# Altium footprint library 2020-06-27_15-02-51.PcbLib: 1 footprints
Each footprint in its own frame and in the unit in brackets; x right, y up, seen from the top. Pads: shape width x height; smd on the part's side, far side on the other; paste and mask are expansions set on the pad; w line width, h text height; cw(c..) or ccw(c..) is an arc to the next point about the centre after c.
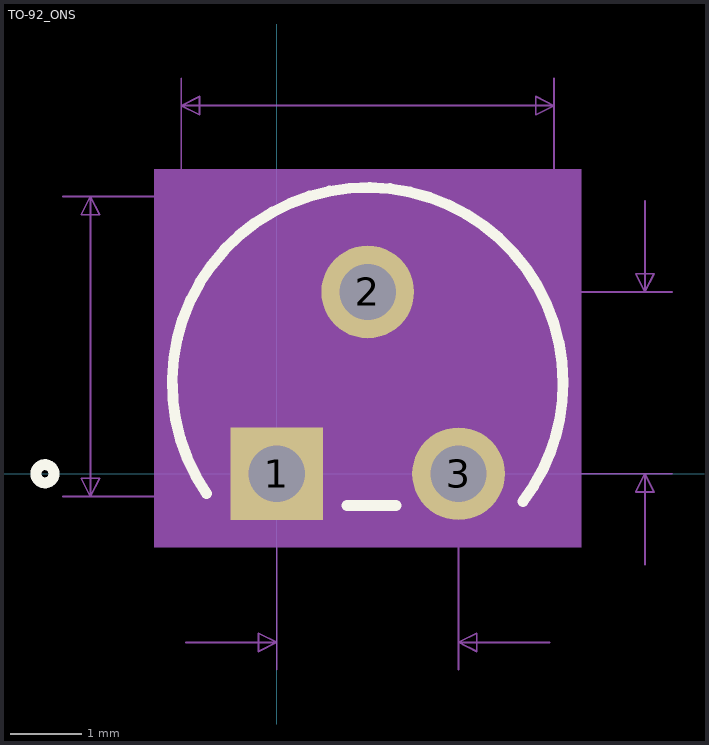
[diagram p0: the footprint, top view; thin cyan lines are the x and y axes]

## TO-92_ONS [mil]
pads (3):
  rect 51x51 hole 31 mask+0: 1(0,0)
  round 51 hole 31 mask+0: 2(50,100) 3(100,0)
Top Overlay:
  circle w6: c-127.5,0 r5
  lines w6: -38.6,-10.88 cw(c50,50) 157.5,50 cw(c50,50) 135.49,-15.17 ; 38.6,-17.5 65.59,-17.5
Mechanical 5:
  region: -67.5,167.5 167.5,167.5 167.5,-40.5 -67.5,-40.5
Mechanical 7:
  lines w1: -117.5,-12.5 50,-12.5 ; -117.5,152.5 50,152.5 ; -52.5,50 -52.5,217.5 ; -50,-92.75 0,-92.75 ; 0,-107.75 0,0 ; 60,100 217.5,100 ; 100,-107.75 100,0 217.5,0 ; 150,-92.75 100,-92.75 ; 152.5,50 152.5,217.5 ; 202.5,-50 202.5,0 ; 202.5,150 202.5,100 ; -102.5,-12.5 -102.5,152.5 ; -102.5,-12.5 -107.5,-2.5 -97.5,-2.5 -102.5,-12.5 ; -102.5,152.5 -107.5,142.5 -97.5,142.5 -102.5,152.5 ; -52.5,202.5 152.5,202.5 ; -52.5,202.5 -42.5,207.5 -42.5,197.5 -52.5,202.5 ; 0,-92.75 -10,-87.75 -10,-97.75 0,-92.75 ; 100,-92.75 110,-87.75 110,-97.75 100,-92.75 ; 152.5,202.5 142.5,207.5 142.5,197.5 152.5,202.5 ; 202.5,0 197.5,-10 207.5,-10 202.5,0 ; 202.5,100 197.5,110 207.5,110 202.5,100
  text "Pinout: 1, 2, 3" at -137.5,-235.5 h50
  text "Default Padstyle: EX51Y51D31P" at -312.5,-295.5 h50
  text "Pin 1 Padstyle: SX51Y51D31P" at -287.5,-355.5 h50
  text "Alt 1 Padstyle: OX60Y90D30P" at -287.5,-415.5 h50
  text "Alt 2 Padstyle: OX90Y60D30P" at -287.5,-475.5 h50
  text "0.205in/5.207mm" at -43.75,222.5 h25
  text "0.1in/2.54mm" at 222.5,37.5 h25
  text "0.1in/2.54mm" at -25,-137.75 h25
  text "0.165in/4.191mm" at -310,37.5 h25
Mechanical 13:
  circle w0: c-42.5,0 r5
  lines w0: -31.24,-12.5 cw(c50,50) 131.24,-12.5
  lines w1: -31.24,-12.5 131.24,-12.5
  lines w6: -10,0 10,0 ; 0,-10 0,10
Mechanical 15:
  region: 162.5,-35.5 -62.5,-35.5 -62.5,162.5 162.5,162.5
  lines w6: -62.5,-35.5 -62.5,162.5 162.5,162.5 162.5,-35.5 -62.5,-35.5
3D body: height 10, standoff 0, extent 0,0 10,10